# Altium footprint library MTGW_R09.PcbLib: 55 footprints (part 1 of 4)
Each footprint in its own frame and in the unit in brackets; x right, y up, seen from the top. Pads: shape width x height; smd on the part's side, far side on the other; paste and mask are expansions set on the pad; w line width, h text height; cw(c..) or ccw(c..) is an arc to the next point about the centre after c.
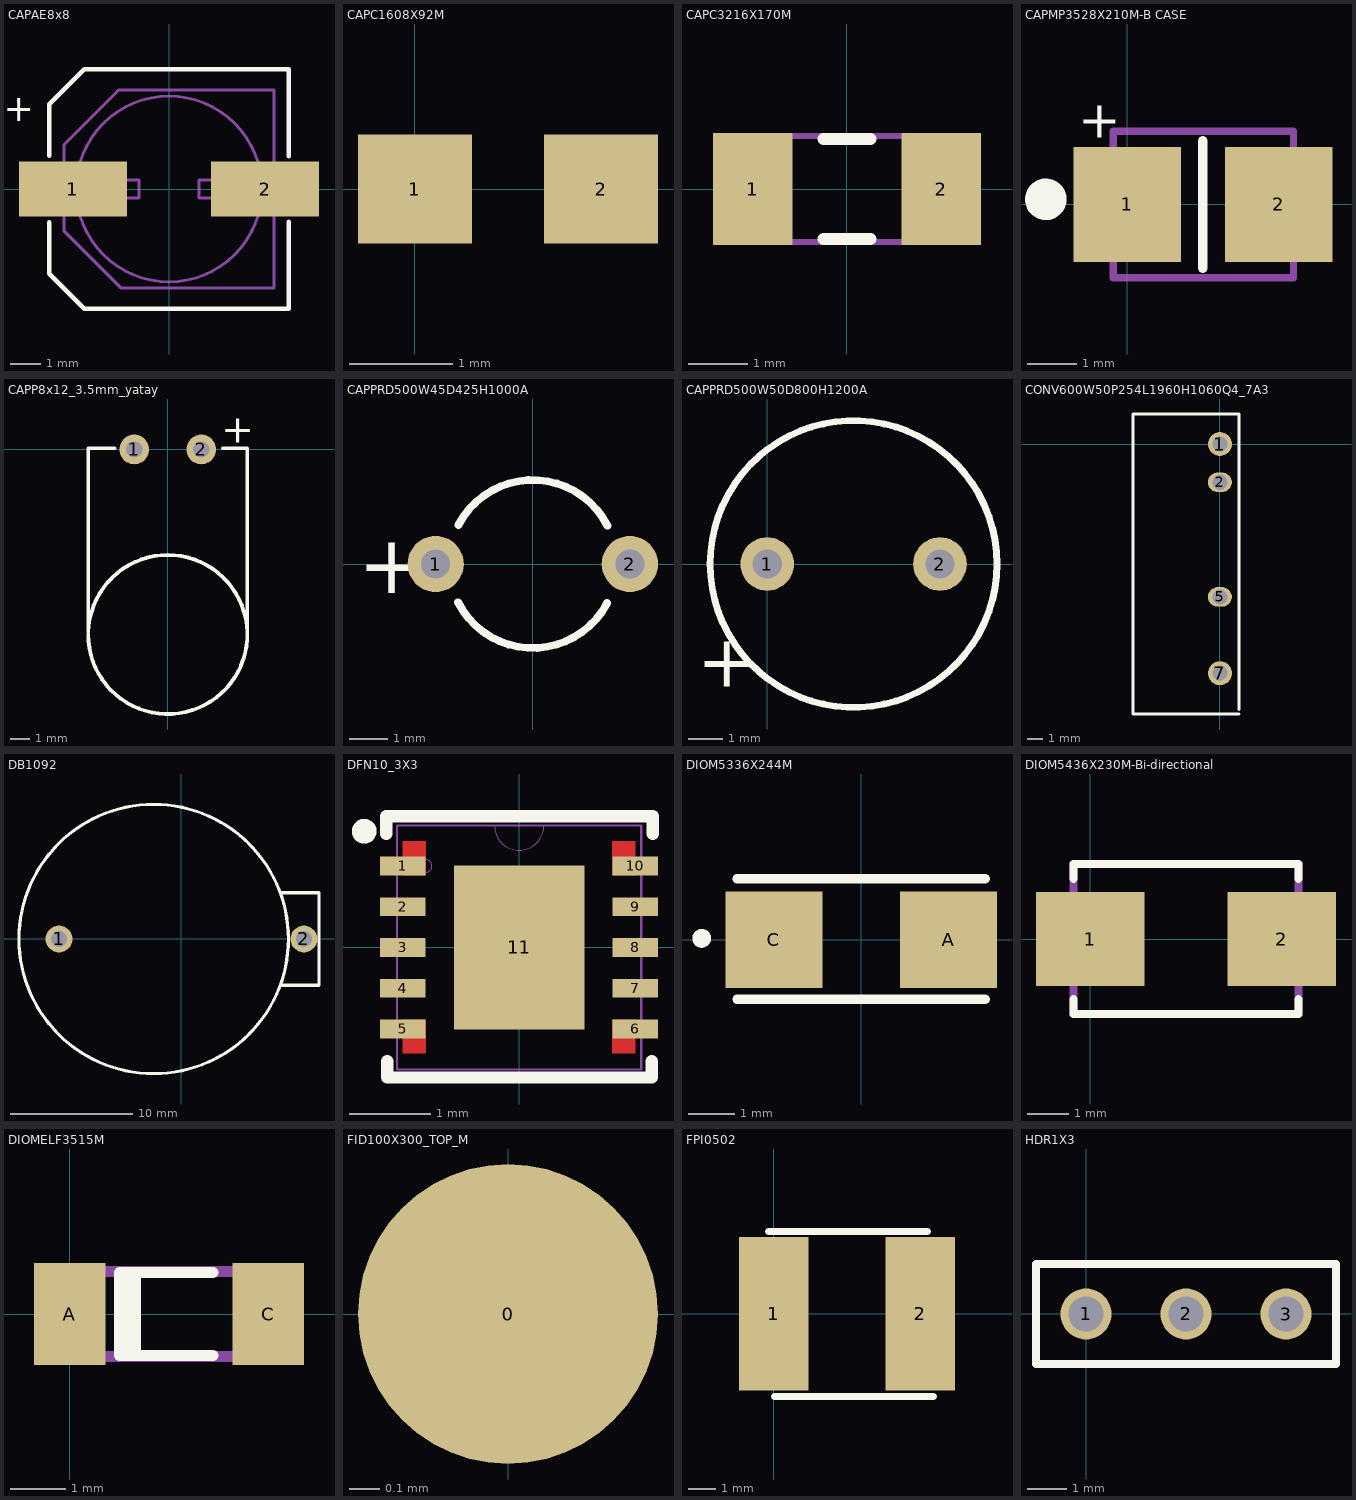
[diagram p0: the footprints below, top view; thin cyan lines are the x and y axes]

## CAPAE8x8 [mm]
pads (2):
  rect 3.6x1.85 smd: 1(-3.209,0) 2(3.209,0)
Top Overlay:
  lines w0.15: -4,-1.118 -4,-1.48 -4,-2.833 -2.833,-4 4,-4 4,-1.092 ; -4,1.118 -4,1.48 -4,2.833 -2.833,4 4,4 4,1.092
  text "+" at -4.496,1.956 h1.52
Mechanical 2:
  circle w0.1: c0,0 r3.1
  lines w0.1: -3.5,-0.3 -1,-0.3 -1,0.3 -3.5,0.3 ; -1.27,3.3 -1.526,3.3 ; 3.5,-0.3 1,-0.3 1,0.3 3.5,0.3 ; -1.526,3.3 3.5,3.3 3.5,-3.3 -1.45,-3.3 -1.613,-3.3 -3.5,-1.413 -3.5,1.489 -1.689,3.3 -1.526,3.3
3D body: height 1, standoff 0, extent -3.4,-3.3 3.65,3.3
3D body: height 8, standoff 1, extent -3.137,-3.287 3.437,3.3

## CAPC1608X92M [mm]
pads (2):
  rect 1.1x1.05 smd: 1(0,0) 2(1.8,0)
3D body "SW3dPS-0603 SMD Capacitor.STEP": height 0.3, standoff 0, extent 0.115,-0.425 1.715,0.375

## CAPC3216X170M [mm]
pads (2):
  rect 1.35x1.9 smd: 1(-1.6,0) 2(1.6,0)
Top Overlay:
  lines w0.2: -0.4,-0.85 0.4,-0.85 ; -0.4,0.85 0.4,0.85
Mechanical 2:
  lines w0.1: -1.7,-0.9 -1.7,0.9 1.7,0.9 1.7,-0.9 -1.7,-0.9
3D body "SW3dPS-1206 SMD Capacitor.STEP": height 1, standoff 0, extent -1.574,-0.8 1.626,0.8

## CAPMP3528X210M-B CASE [mm]
pads (2):
  rect 2.2x2.35 smd: 1(0,0) 2(3.1,0)
Top Overlay:
  circle w0.45: c-1.663,0.104 r0.2
  lines w0.2: 1.55,-1.3 1.55,1.3
  text "+" at -1.001,1.369 h0.76
Mechanical 2:
  lines w0.15: -0.279,-1.5 -0.279,1.5 3.404,1.5 3.404,-1.5 -0.279,-1.5
3D body "User Library-CaseB_3528-21.STEP": height 1.9, standoff 0, extent -0.2,-1.4 3.3,1.4

## CAPP8x12_3.5mm_yatay [mm]
pads (2):
  round 1.55 hole 0.85: 1(-1.75,0) 2(1.75,0)
Top Overlay:
  lines w0.2: -4.15,-9.653 ccw(c0,-9.653) -4.148,-9.536 ; -4.15,-9.536 -4.15,0.061 -2.769,0.061 ; 2.87,0.061 4.15,0.061 4.15,-9.914
  text "+" at 2.779,0.349 h1.5
3D body "User Library-Capacitor Radial ElectroliticCAPPR500-800X1200.STEP": height 8.1, standoff 0.1, extent -4.012,-13.242 3.998,1.468

## CAPPRD500W45D425H1000A [mm]
pads (2):
  round 1.45 hole 0.75: 1(-2.5,0) 2(2.5,0)
Top Overlay:
  lines w0.2: -1.925,-0.987 ccw(c0,0) 1.914,-1.008 ; -1.914,1.008 cw(c0,0) 1.925,0.987
  text "+" at -4.5,-0.75 h1.5

## CAPPRD500W50D800H1200A [mm]
pads (2):
  round 1.55 hole 0.85: 1(0,0) 2(5,0)
Top Overlay:
  circle w0.2: c2.5,0 r4.15
  text "+" at -2.032,-3.556 h1.5
3D body "User Library-Capacitor Radial ElectroliticCAPPR500-800X1200.STEP": height 12.01, standoff -2.7, extent -1.512,-3.962 6.464,4.039

## CONV600W50P254L1960H1060Q4_7A3 [mm]
pads (4):
  round 1.6 hole 1: 1(0,0) 7(0,-15.24)
  oval 1.6x1.3 hole 1: 2(0,-2.54) 5(0,-10.16)
Top Overlay:
  lines w0.2: 1.27,-17.955 -5.78,-17.955 -5.78,2 1.27,2 1.27,-17.65
3D body: height 10.2, standoff 0, extent -5.78,-17.955 1.27,2

## DB1092 [mm]
pads (2):
  round 2.2 hole 1.3: 1(-10,0) 2(10,0)
Top Overlay:
  circle w0.254: c-2.269,0 r11
  lines w0.254: 8.161,3.775 11.231,3.775 11.231,-3.775 8.207,-3.775
3D body "User Library-CR2032_HOR_HOLD.step": height 8.5, standoff -4, extent -13.269,-11 11.231,11

## DFN10_3X3 [mil]
pads (11):
  rect 22x9 smd paste-4.5 mask+0: 1(-56.1,39.37) 2(-56.1,19.68) 3(-56.1,0) 4(-56.1,-19.68) 5(-56.1,-39.37) 6(56.1,-39.37) 7(56.1,-19.68) 8(56.1,0) 9(56.1,19.68) 10(56.1,39.37)
  rect 63x79 smd paste-31.5 mask+0: 11(0,0)
Top Layer:
  region: 0,39.5
  region: 0,-39.5
  region: -45.1,51.21 -56.1,51.21 -56.1,34.87 -45.1,34.87
  region: -45.1,-34.87 -56.1,-34.87 -56.1,-51.21 -45.1,-51.21
  region: 56.1,51.21 45.1,51.21 45.1,34.87 56.1,34.87
  region: 56.1,-34.87 45.1,-34.87 45.1,-51.21 56.1,-51.21
Top Overlay:
  lines w6: -74.06,53.2 cw(c-74.8,56.1) -72.91,53.77 ; -64.13,55.01 -64.13,63.32 64.62,63.32 64.62,55.01 ; -63.65,-55.01 -63.65,-62.81 64.14,-62.81 64.14,-55.01
Top Paste:
  region: -45.1,43.87 -67.1,43.87 -67.1,34.87 -45.1,34.87
  region: -45.1,24.18 -67.1,24.18 -67.1,15.19 -45.1,15.19
  region: -45.1,4.5 -67.1,4.5 -67.1,-4.5 -45.1,-4.5
  region: -45.1,-15.19 -67.1,-15.19 -67.1,-24.18 -45.1,-24.18
  region: -45.1,-34.87 -67.1,-34.87 -67.1,-43.87 -45.1,-43.87
  region: 67.1,-34.87 45.1,-34.87 45.1,-43.87 67.1,-43.87
  region: 67.1,-15.19 45.1,-15.19 45.1,-24.18 67.1,-24.18
  region: 67.1,4.5 45.1,4.5 45.1,-4.5 67.1,-4.5
  region: 67.1,24.18 45.1,24.18 45.1,15.19 67.1,15.19
  region: 67.1,43.87 45.1,43.87 45.1,34.87 67.1,34.87
  region: 31.5,39.5 -31.5,39.5 -31.5,-39.5 31.5,-39.5
Top Solder:
  region: -45.1,43.87 -67.1,43.87 -67.1,34.87 -45.1,34.87
  region: -45.1,24.18 -67.1,24.18 -67.1,15.19 -45.1,15.19
  region: -45.1,4.5 -67.1,4.5 -67.1,-4.5 -45.1,-4.5
  region: -45.1,-15.19 -67.1,-15.19 -67.1,-24.18 -45.1,-24.18
  region: -45.1,-34.87 -67.1,-34.87 -67.1,-43.87 -45.1,-43.87
  region: 67.1,-34.87 45.1,-34.87 45.1,-43.87 67.1,-43.87
  region: 67.1,-15.19 45.1,-15.19 45.1,-24.18 67.1,-24.18
  region: 67.1,4.5 45.1,4.5 45.1,-4.5 67.1,-4.5
  region: 67.1,24.18 45.1,24.18 45.1,15.19 67.1,15.19
  region: 67.1,43.87 45.1,43.87 45.1,34.87 67.1,34.87
  region: 0,39.5
  region: 0,-39.5
Mechanical 13:
  circle w0: c-45.1,39.37 r3
  lines w0: -12,59 ccw(c0,59) 12,59
  lines w1: -59,-59 59,-59 59,59 -59,59 -59,-59
3D body "User Library-DFN-10.STEP": height 31.5, standoff 0, extent -59.06,-59.05 59.06,59.06
3D body: height 10, standoff 0, extent 0,0 10,10

## DIOM5336X244M [mm]
pads (2):
  rect 2.07x2.06 smd: A(1.865,0) C(-1.865,0)
Top Overlay:
  circle w0.2: c-3.404,0.025 r0.1
  lines w0.2: -2.65,-1.27 2.65,-1.27 ; -2.65,1.295 2.65,1.295
3D body "User Library-DO-214AC SMA.step": height 2.32, standoff -0.09, extent -2.612,-1.3 2.588,1.3

## DIOM5436X230M-Bi-directional [mm]
pads (2):
  rect 2.6x2.25 smd: 1(0,0) 2(4.6,0)
Top Overlay:
  lines w0.2: -0.4,-1.8 5,-1.8 ; -0.4,-1.75 -0.4,-1.45 ; -0.4,1.45 -0.4,1.75 ; -0.4,1.8 5,1.8 ; 5,-1.75 5,-1.45 ; 5,1.45 5,1.75
Mechanical 2:
  lines w0.2: -0.4,-1.8 -0.4,1.8 5,1.8 5,-1.8 -0.4,-1.8
3D body "User Library-Diode Molded BodyDIOM5436X244N.STEP": height 2.41, standoff -0.03, extent -0.439,-1.803 4.961,1.797

## DIOMELF3515M [mm]
pads (2):
  rect 1.3x1.85 smd: A(0,0) C(3.6,0)
Top Overlay:
  lines w0.2: 2.6,-0.75 0.901,-0.75 0.901,0.75 2.6,0.75 ; 1.041,-0.551 1.19,-0.7 1.19,0.7 1.041,0.551 1.041,-0.551
Mechanical 2:
  lines w0.2: 0.35,-0.775 0.35,0.762 ; 3.25,-0.762 3.25,0.775 ; 0.05,-0.775 3.55,-0.775 3.55,0.775 0.05,0.775 0.05,-0.775
3D body "User Library-Diode MELFDIOMELF3515N.STEP": height 1.5, standoff 0, extent 0.05,-0.75 3.55,0.75

## FID100X300_TOP_M [mm]
pads (1):
  round 1 smd mask+1: 0(0,0)

## FPI0502 [mm]
pads (2):
  rect 2.5x5.5 smd: 1(0,0) 2(5.25,0)
Top Overlay:
  lines w0.254: -0.178,2.946 5.512,2.946 ; 0.025,-2.972 5.715,-2.972
3D body: height 2.5, standoff 0, extent -0.384,-3 5.616,3

## HDR1X3 [mm]
pads (3):
  round 1.3 hole 0.9: 1(0,0) 2(2.54,0) 3(5.08,0)
Top Overlay:
  lines w0.2: -1.27,-1.27 -1.27,1.27 6.35,1.27 6.35,-1.27 -1.27,-1.27